# Altium footprint library Fuse$.PcbLib: 21 footprints (part 1 of 2)
Each footprint in its own frame and in the unit in brackets; x right, y up, seen from the top. Pads: shape width x height; smd on the part's side, far side on the other; paste and mask are expansions set on the pad; w line width, h text height; cw(c..) or ccw(c..) is an arc to the next point about the centre after c.
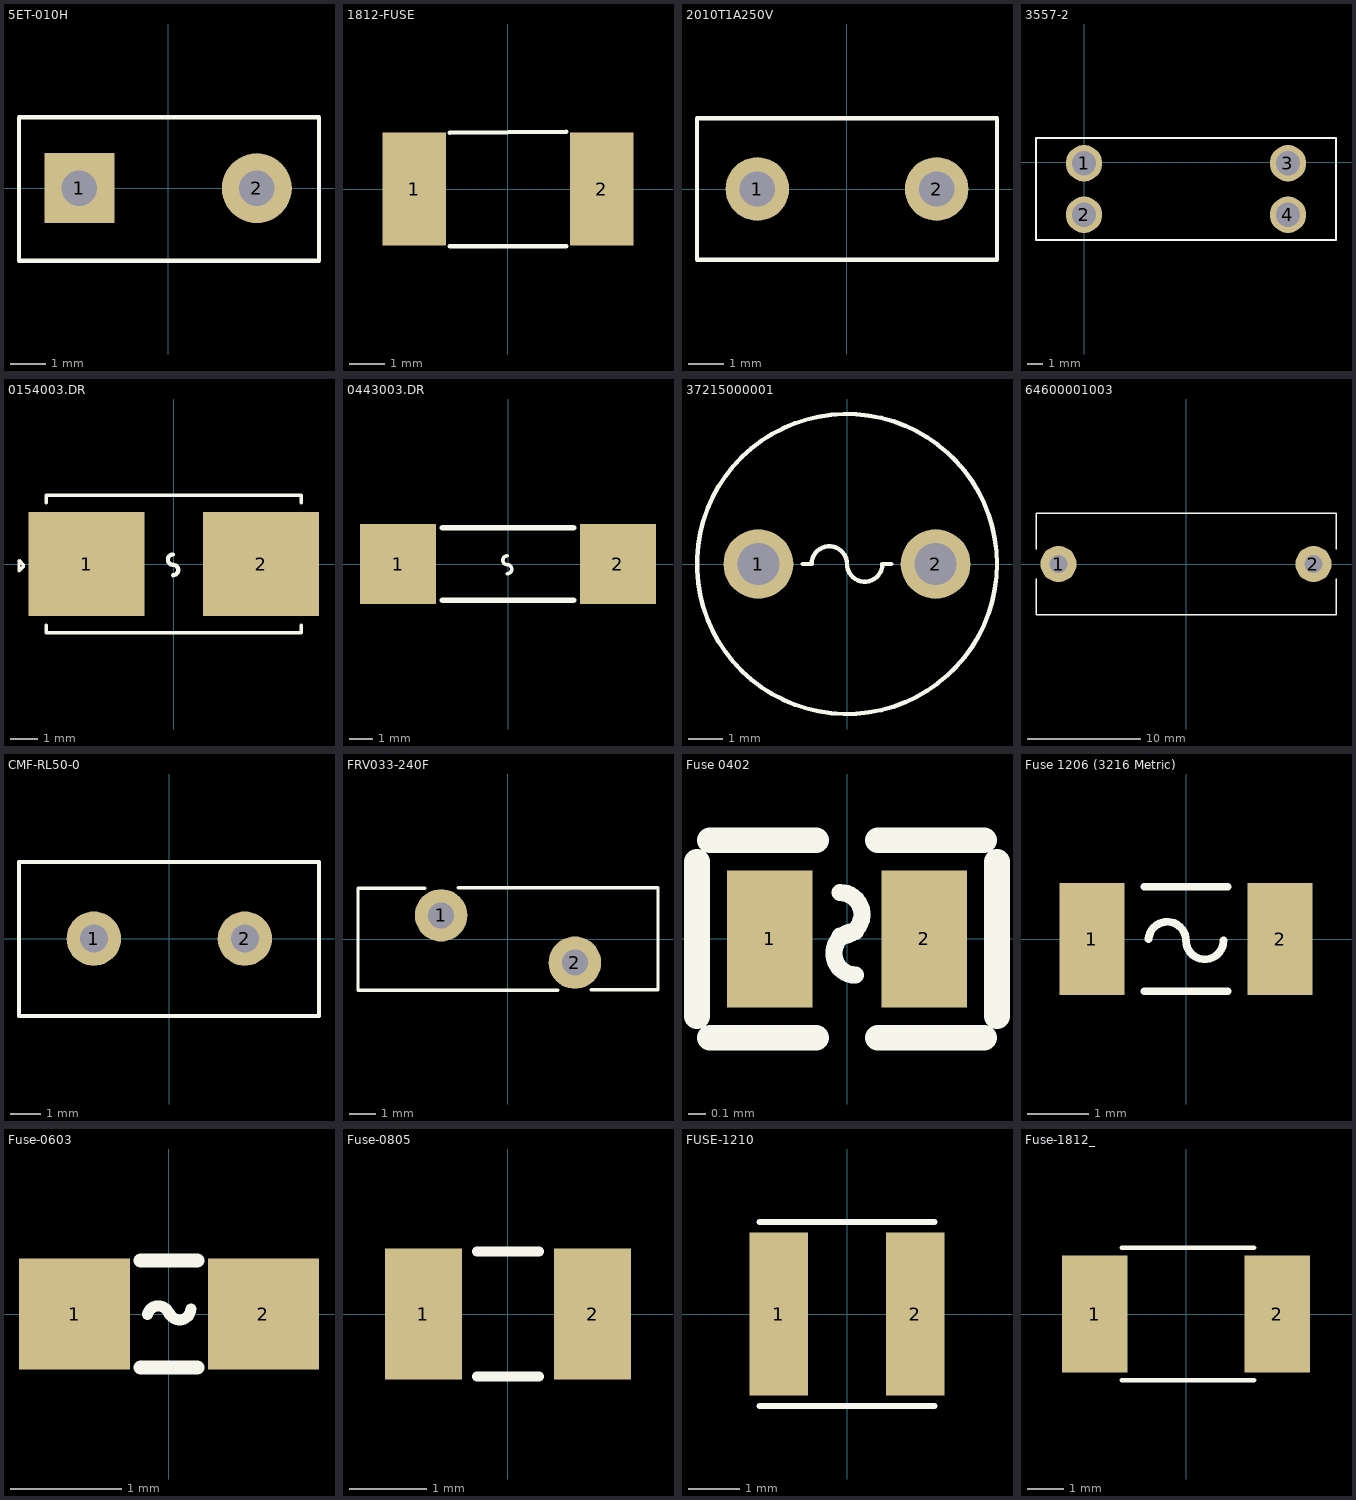
[diagram p0: the footprints below, top view; thin cyan lines are the x and y axes]

## 5ET-010H [mm]
pads (2):
  rect 2x2 hole 1.02: 1(-2.54,0)
  round 2 hole 1.02: 2(2.54,0)
Top Overlay:
  lines w0.127: -4.267,-2.083 -4.267,2.035 4.318,2.035 4.318,-2.083 -4.267,-2.083
3D body "5ET-010H.STEP": height 8.5, standoff -3.5, extent -4.225,-2.032 4.275,1.969

## 1812-FUSE [mm] "13.2V 2.6A 40A 800mW -40?~+85? 5.2A 10mO 2.5s 50mO 1812 Resettable Fuses ROHS"
pads (2):
  rect 1.78x3.15 smd mask+0.05: 1(-2.615,0) 2(2.615,0)
Top Overlay:
  lines w0.127: -1.626,-1.6 1.626,-1.6 ; -1.626,1.575 1.626,1.6
3D body "MF-MSMF050.STEP": height 0.85, standoff 0, extent -2.275,-1.62 2.275,1.62

## 2010T1A250V [mm]
pads (2):
  round 1.8 hole 1 paste-2539.97 mask+0.051: 1(-2.54,0) 2(2.54,0)
Top Overlay:
  lines w0.127: -4.25,-2 -4.25,2 4.25,2 4.25,-2 -4.25,-2
3D body "2010T.step": height 8.5, standoff -3.5, extent -4.25,-2 4.25,2.001

## 3557-2 [mm]
pads (4):
  round 2.4 hole 1.6: 1(-0.025,-0.051) 2(-0.025,-3.451) 3(13.445,-0.051) 4(13.445,-3.451)
Top Overlay:
  lines w0.127: -3.195,-5.116 -3.195,1.614 16.615,1.614 16.615,-5.116 -3.195,-5.116

## 0154003.DR [mil]
pads (2):
  rect 167x150 smd: 1(-125.5,0) 2(125.5,0)
Top Overlay:
  lines w5: -183.66,-87.99 -183.66,-99.02 183.66,-99.02 183.66,-87.99 ; -183.66,87.99 -183.66,99.02 183.66,99.02 183.66,87.99 ; -223,-10 -217,-4 -217,-1 -223,5 -223,-10
  lines w5.98: -1.18,-16.18 ccw(c-1.18,-8.68) -1.18,-1.18 cw(c-1.18,6.32) -1.18,13.82
3D body "step_temp.STEP": height 150, standoff 0, extent -191.54,-99.02 191.54,99.02

## 0443003.DR [mm]
pads (2):
  rect 3.25x3.43 smd: 1(-4.7,0) 2(4.7,0)
Top Overlay:
  lines w0.152: -0.03,-0.411 ccw(c-0.03,-0.221) -0.03,-0.03 cw(c-0.03,0.16) -0.03,0.351
  lines w0.254: -2.8,-1.55 2.8,-1.55 ; -2.8,1.55 2.8,1.55
3D body "0443003.DR.STEP": height 3.12, standoff 0, extent -5.05,-1.56 5.05,1.56

## 37215000001 [mm]
pads (2):
  round 2 hole 1.2 paste-2539.97 mask+0.051: 1(-2.54,0) 2(2.54,0)
Top Overlay:
  circle w0.127: c0,0 r4.3
  lines w0.127: -1.27,0 -1.016,0 cw(c-0.508,0) 0,0 ccw(c0.508,0) 1.016,0 1.27,0
3D body "C142820.step": height 8, standoff -3, extent -4.2,-4.188 4.2,4.188

## 64600001003 [mm]
pads (2):
  round 3.2 hole 1.6: 1(-11.3,0) 2(11.3,0)
Top Overlay:
  lines w0.127: -13.3,-1.305 -13.3,-4.5 0,-4.5 13.3,-4.5 13.3,-1.305 ; -13.3,1.305 -13.3,4.5 0,4.5 13.3,4.5 13.3,1.305
3D body "FUSE_646_1_LTF.step": height 11.46, standoff -5.08, extent -12.903,-2.286 12.903,2.21

## CMF-RL50-0 [mm]
pads (2):
  round 1.8 hole 0.92: 1(-2.5,0) 2(2.5,0)
Top Overlay:
  lines w0.127: -4.978,-2.565 4.953,-2.565 4.953,2.54 -4.978,2.54 -4.978,-2.565
3D body "cmf-rl50.stp": height 13.9, standoff -2.85, extent -4.9,-2.5 4.9,2.5

## FRV033-240F [mm]
pads (2):
  round 2 hole 1: 1(-2.55,0.9) 2(2.55,-0.9)
Top Overlay:
  lines w0.127: -3.175,1.93 -5.715,1.93 -5.715,-1.956 1.905,-1.956 ; -1.905,1.956 5.715,1.956 5.715,-1.93 3.175,-1.93
3D body "FRV033-240F.STEP": height 17, standoff -7.1, extent -5.7,-1.905 5.7,1.895

## Fuse 0402 [mm]
pads (2):
  rect 0.5x0.8 smd: 1(-0.45,0) 2(0.45,0)
Top Overlay:
  lines w0.1: -0.04,0.016 ccw(c-0.04,0.143) -0.04,0.27 ; 0.05,-0.21 cw(c0.05,-0.083) 0.05,0.044
  lines w0.15: -0.874,-0.45 -0.874,-0.4 -0.874,0.4 -0.874,0.45 ; -0.8,-0.575 -0.18,-0.575 ; -0.8,0.575 -0.18,0.575 ; 0.18,-0.575 0.8,-0.575 ; 0.18,0.575 0.8,0.575 ; 0.874,-0.45 0.874,-0.4 0.874,0.4 0.874,0.45
3D body "User Library-FUSE0402-1.step": height 0.33, standoff 0, extent -0.5,-0.25 0.5,0.25

## Fuse 1206 (3216 Metric) [mm] "0.126\" L x 0.062\" W x 0.026\" H (3.20mm x 1.58mm x 0.65mm)"
pads (2):
  rect 1.06x1.82 smd: 1(-1.528,0) 2(1.528,0)
Top Overlay:
  lines w0.127: -0.68,-0.849 0.68,-0.849 ; -0.68,0.849 0.68,0.849 ; -0.609,-0.002 cw(c-0.305,-0.025) 0,-0.025 ccw(c0.305,-0.025) 0.61,-0.025
3D body "0685H9150-01.STEP": height 0.85, standoff 0, extent -1.6,-0.79 1.6,0.79

## Fuse-0603 [mm]
pads (2):
  rect 1x1 smd: 1(-0.85,0) 2(0.85,0)
Top Overlay:
  lines w0.1: -0.193,-0.003 cw(c-0.096,-0.027) 0,0 ; 0.007,0.002 ccw(c0.096,0.047) 0.196,0.046
  lines w0.127: -0.254,-0.483 0.254,-0.483 ; -0.254,0.483 0.254,0.483
3D body "User Library-RESC1608X05N.step": height 0.45, standoff 0, extent -0.775,-0.425 0.775,0.425

## Fuse-0805 [mm]
pads (2):
  rect 1x1.7 smd: 1(-1.1,0) 2(1.1,0)
Top Overlay:
  lines w0.127: -0.406,-0.813 0.406,-0.813 ; -0.406,0.813 0.406,0.813
3D body "User Library-fuse0805L050WR.step": height 1.24, standoff 0, extent -1.105,-0.749 1.105,0.749

## FUSE-1210 [mm]
pads (2):
  rect 1.15x3.2 smd: 1(-1.34,0) 2(1.34,0)
Top Overlay:
  lines w0.127: -1.715,-1.803 1.715,-1.803 ; -1.715,1.803 1.715,1.803
3D body "1210L075_24PR.stp": height 1.8, standoff 0, extent -1.607,-1.288 1.607,1.288

## Fuse-1812_ [mm]
pads (2):
  rect 1.78x3.2 smd: 1(-2.49,0) 2(2.49,0)
Top Overlay:
  lines w0.127: -1.753,-1.803 1.854,-1.803 ; -1.753,1.803 1.854,1.803
3D body "User Library-Fuse 1812.step": height 1.03, standoff 0, extent -2.365,-1.74 2.37,1.74